# Altium schematic symbol library Serigrafias.SchLib: 10 symbols
Pins are listed as number, name and electrical type; pins without a type are passive.

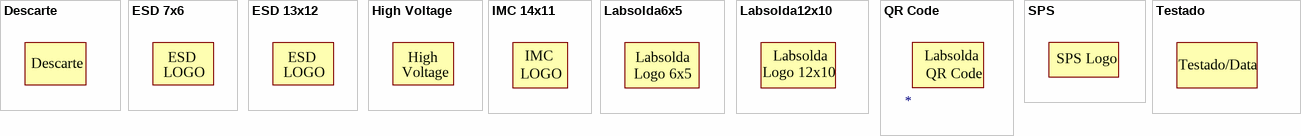
[diagram p0: symbols Descarte to Testado]

## Descarte
designator Logo?  (value not drawn)  (no BOM)
footprint DESCARTE7x7
footprint DESCARTE 11X11

## ESD 7x6
designator Logo?  (value not drawn)  (no BOM)
footprint ESD 7x6
text: ESD; LOGO

## ESD 13x12
designator Logo?  (value not drawn)  (no BOM)
footprint ESD13x12
text: ESD; LOGO

## High Voltage
designator Logo?  (value not drawn)  (no BOM)
footprint High Voltage
text: High; Voltage

## IMC 14x11
designator Logo?  (value not drawn)  (no BOM)
footprint IMC14x11
text: IMC; LOGO

## Labsolda6x5
designator Logo?  (value not drawn)  (no BOM)
footprint LABSOLDA 6x5
footprint LABSOLDA 6x5 - Bottom
text: Labsolda; Logo 6x5

## Labsolda12x10
designator Logo?  (value not drawn)  (no BOM)
footprint LABSOLDA 12x10
text: Labsolda; Logo 12x10

## QR Code
designator Logo?  (no BOM)
QR Code URL Labsolda 16x16mm
footprint QR Code (16x16mm)
text: Labsolda

## SPS
designator Logo?  (value not drawn)  (no BOM)
footprint SPS
text: SPS Logo

## Testado
designator Logo?  (value not drawn)  (no BOM)
footprint Testado
text: Testado/Data